# Altium schematic symbol library EEE-FK0J331P.SchLib: 1 symbol
Pins are listed as number, name and electrical type; pins without a type are passive.

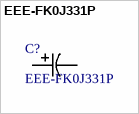
[diagram p0: symbol EEE-FK0J331P]

## EEE-FK0J331P
designator C?
No Description Available; Manufacturer_Name: Panasonic; Copyright: Copyright (C) 2026 Ultra Librarian. All rights reserved.; Manufacturer_Part_Number: EEE-FK0J331P
footprint CAP_EEFK_E_PAN
pins: 1, 2